# Altium footprint library 1715721.PcbLib: 1 footprints
Each footprint in its own frame and in the unit in brackets; x right, y up, seen from the top. Pads: shape width x height; smd on the part's side, far side on the other; paste and mask are expansions set on the pad; w line width, h text height; cw(c..) or ccw(c..) is an arc to the next point about the centre after c.
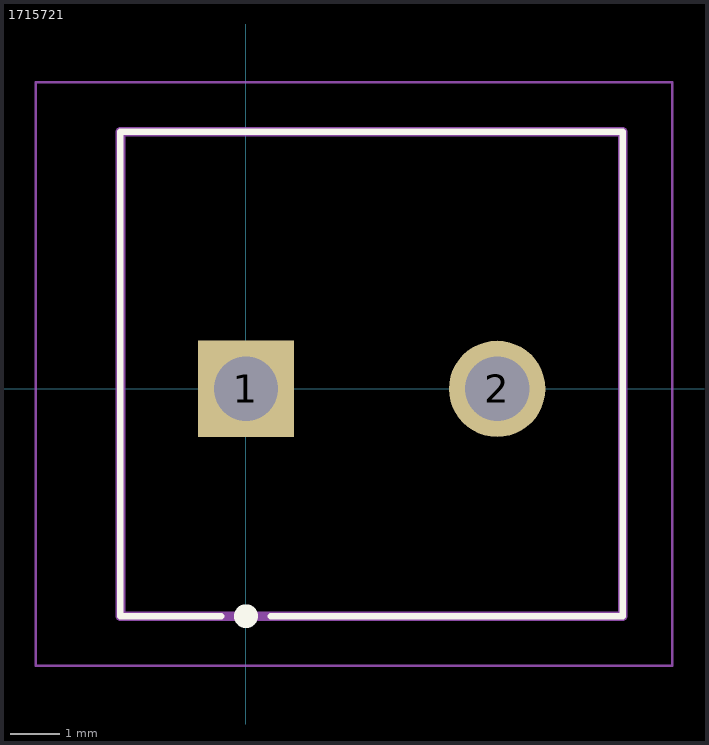
[diagram p0: the footprint, top view; thin cyan lines are the x and y axes]

## 1715721 [mm] "Single-row, 2-pin screw terminal. Phoenix Contact 1715721"
pads (2):
  rect 1.95x1.95 hole 1.3: 1(0,0)
  round 1.95 hole 1.3: 2(5.08,0)
Top Overlay:
  circle w0.381: c0,-4.597 r0.05
  lines w0.127: -0.5,-4.6 -2.54,-4.6 -2.54,5.2 7.62,5.2 7.62,-4.572 ; 0.5,-4.6 7.62,-4.6
Mechanical 13:
  lines w0.2: -2.54,-4.6 7.62,-4.6 7.62,5.2 -2.54,5.2 -2.54,-4.6
Mechanical 15:
  lines w0.05: -4.25,-5.6 8.62,-5.6 8.62,6.2 -4.25,6.2 -4.25,-5.6
3D body "1715721.stp": height 14.2, standoff -3.5, extent -3.18,-4.61 7.55,5.22